# Altium schematic symbol library PM254-1-10-Z-8.5.SCHLIB: 1 symbol
Pins are listed as number, name and electrical type; pins without a type are passive.

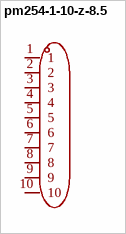
[diagram p0: symbol pm254-1-10-z-8.5]

## pm254-1-10-z-8.5
designator U??  (value not drawn)
插孔结构:1x10P;间距:2.54mm;行距:-;圆孔/方孔:方孔;安装方式:直插;排数:单排;总孔位数:10P;额定电流:3A;额定电压:-;插孔方向:顶部;塑高:8.5mm;触头材质:铜合金;工作温度:-40℃~+105℃;; Manufacturer: HCTL(华灿天禄); AddInBom: yes; ModelId: 08a5ee31ec6747838a696d2ac093ffa4; ModelName: HDR-TH_10P-P2.54-F-LI-1X10P; ModelTransform: 1009.87987,100,0,0,0,0,0,0,-125.984; Holes Structure: 1x10P; Pitch: 2.54mm; Circular Hole / Square Hole: 方孔; Number of Positions: 10P; Current Rating: 3A; Holes Direction: 顶部; PIN Length: 3.2mm; Symbol: PM254-1-10-Z-8.5; LCSC Part Name: 1x10P 间距:2.54mm 直插; SupplierPart: C2897373; ManufacturerPart: PM254-1-10-Z-8.5; Supplier Footprint: 插件,P=2.54mm; JLCPCB Part Class: Extended Part; Datasheet: https://item.szlcsc.com/datasheet/PM254-1-10-Z-8.5/3142378.html; Supplier: LCSC; ConvertToPcb: yes; FootprintName: HDR-TH_10P-P2.54-V-F; Row Spacing: -; Mounting Type: 直插; Number of Rows: 单排; Voltage Rating (Max): -; Insulation Height: 8.5mm; Contact Material: 铜合金; Operating Temperature: -40℃~+105℃
footprint HDR-TH_10P-P2.54-V-F
pins: 1, 2, 3, 4, 5, 6, 7, 8, 9, 10